# Altium footprint library Package_DFN_QFN.PcbLib: 735 footprints (part 19 of 46)
Each footprint in its own frame and in the unit in brackets; x right, y up, seen from the top. Pads: shape width x height; smd on the part's side, far side on the other; paste and mask are expansions set on the pad; w line width, h text height; cw(c..) or ccw(c..) is an arc to the next point about the centre after c.
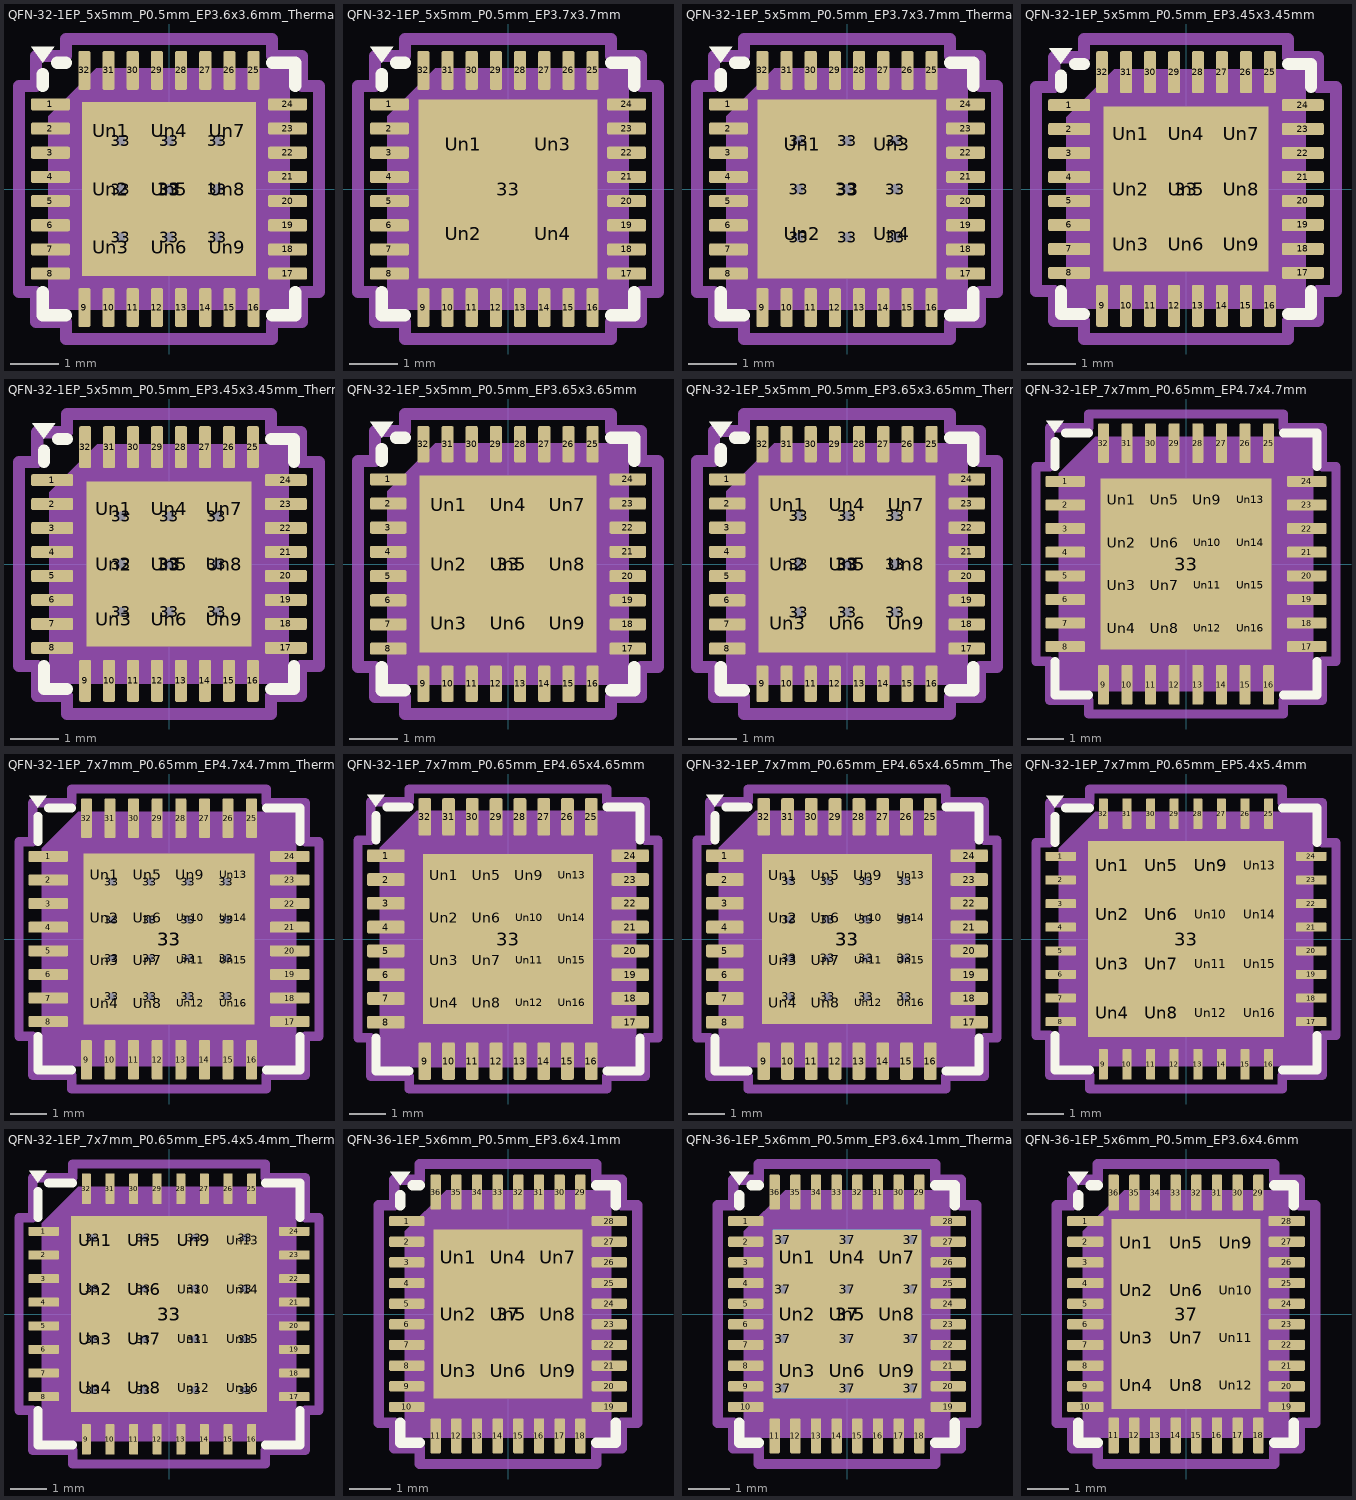
[diagram p18: the footprints below, top view; thin cyan lines are the x and y axes]

## QFN-32-1EP_5x5mm_P0.5mm_EP3.6x3.6mm_ThermalVias [mm] "QFN-32-1EP_5x5mm_P0.5mm_EP3.6x3.6mm_ThermalVias"
pads (52):
  rrect25% 0.8x0.25 smd: 1(-2.45,1.75) 2(-2.45,1.25) 3(-2.45,0.75) 4(-2.45,0.25) 5(-2.45,-0.25) 6(-2.45,-0.75) 7(-2.45,-1.25) 8(-2.45,-1.75) 17(2.45,-1.75) 18(2.45,-1.25) 19(2.45,-0.75) 20(2.45,-0.25) 21(2.45,0.25) 22(2.45,0.75) 23(2.45,1.25) 24(2.45,1.75)
  rrect25% 0.25x0.8 smd: 9(-1.75,-2.45) 10(-1.25,-2.45) 11(-0.75,-2.45) 12(-0.25,-2.45) 13(0.25,-2.45) 14(0.75,-2.45) 15(1.25,-2.45) 16(1.75,-2.45) 25(1.75,2.45) 26(1.25,2.45) 27(0.75,2.45) 28(0.25,2.45) 29(-0.25,2.45) 30(-0.75,2.45) 31(-1.25,2.45) 32(-1.75,2.45)
  round 0.5 hole 0.2: 33(-1,-1) 33(-1,0) 33(-1,1) 33(0,-1) 33(0,0) 33(0,1) 33(1,-1) 33(1,0) 33(1,1)
  rect 3.6x3.6 smd: 33(0,0)
  rect 2.5x2.5 smd far side: 33(0,0)
  rrect25% 0.97x0.97 on Top Paste: Un1(-1.2,1.2) Un2(-1.2,0) Un3(-1.2,-1.2) Un4(0,1.2) Un5(0,0) Un6(0,-1.2) Un7(1.2,1.2) Un8(1.2,0) Un9(1.2,-1.2)
F.SilkS:
  region: -2.61,2.61 -2.85,2.94 -2.37,2.94
  lines w0.254: -2.61,-2.135 -2.61,-2.61 -2.135,-2.61 ; -2.61,2.135 -2.61,2.37 ; -2.31,2.61 -2.135,2.61 ; 2.135,-2.61 2.61,-2.61 2.61,-2.135 ; 2.135,2.61 2.61,2.61 2.61,2.135
Top Component Center:
  lines w0.127: -0.127,0 0.127,0 -0.127,0 ; 0,-0.127 0,0.127 0,-0.127
Top Assembly:
  region: 2.5,-2.5 -2.5,-2.5 -2.5,1.5 -1.5,2.5 2.5,2.5
Top Courtyard:
  lines w0.254: -3.1,-2.13 -2.75,-2.13 -2.75,-2.75 -2.13,-2.75 -2.13,-3.1 2.13,-3.1 2.13,-2.75 2.75,-2.75 2.75,-2.13 3.1,-2.13 3.1,2.13 2.75,2.13 2.75,2.75 2.13,2.75 2.13,3.1 -2.13,3.1 -2.13,2.75 -2.75,2.75 -2.75,2.13 -3.1,2.13 -3.1,-2.13
Top Designator:
  text ".Designator" at -3.43,-0.344 h1.52
3D body "QFN-32-1EP_5x5mm_P0.5mm_EP3.7x3.7mm.step": height 0.85, standoff 0, extent -2.5,-2.5 2.5,2.5

## QFN-32-1EP_5x5mm_P0.5mm_EP3.7x3.7mm [mm] "QFN-32-1EP_5x5mm_P0.5mm_EP3.7x3.7mm"
pads (37):
  rrect25% 0.8x0.25 smd: 1(-2.45,1.75) 2(-2.45,1.25) 3(-2.45,0.75) 4(-2.45,0.25) 5(-2.45,-0.25) 6(-2.45,-0.75) 7(-2.45,-1.25) 8(-2.45,-1.75) 17(2.45,-1.75) 18(2.45,-1.25) 19(2.45,-0.75) 20(2.45,-0.25) 21(2.45,0.25) 22(2.45,0.75) 23(2.45,1.25) 24(2.45,1.75)
  rrect25% 0.25x0.8 smd: 9(-1.75,-2.45) 10(-1.25,-2.45) 11(-0.75,-2.45) 12(-0.25,-2.45) 13(0.25,-2.45) 14(0.75,-2.45) 15(1.25,-2.45) 16(1.75,-2.45) 25(1.75,2.45) 26(1.25,2.45) 27(0.75,2.45) 28(0.25,2.45) 29(-0.25,2.45) 30(-0.75,2.45) 31(-1.25,2.45) 32(-1.75,2.45)
  rect 3.7x3.7 smd: 33(0,0)
  rrect17% 1.49x1.49 on Top Paste: Un1(-0.925,0.925) Un2(-0.925,-0.925) Un3(0.925,0.925) Un4(0.925,-0.925)
F.SilkS:
  region: -2.61,2.61 -2.85,2.94 -2.37,2.94
  lines w0.254: -2.61,-2.135 -2.61,-2.61 -2.135,-2.61 ; -2.61,2.135 -2.61,2.37 ; -2.31,2.61 -2.135,2.61 ; 2.135,-2.61 2.61,-2.61 2.61,-2.135 ; 2.135,2.61 2.61,2.61 2.61,2.135
Top Component Center:
  lines w0.127: -0.127,0 0.127,0 -0.127,0 ; 0,-0.127 0,0.127 0,-0.127
Top Assembly:
  region: 2.5,-2.5 -2.5,-2.5 -2.5,1.5 -1.5,2.5 2.5,2.5
Top Courtyard:
  lines w0.254: -3.1,-2.13 -2.75,-2.13 -2.75,-2.75 -2.13,-2.75 -2.13,-3.1 2.13,-3.1 2.13,-2.75 2.75,-2.75 2.75,-2.13 3.1,-2.13 3.1,2.13 2.75,2.13 2.75,2.75 2.13,2.75 2.13,3.1 -2.13,3.1 -2.13,2.75 -2.75,2.75 -2.75,2.13 -3.1,2.13 -3.1,-2.13
Top Designator:
  text ".Designator" at -3.43,-0.344 h1.52
3D body "QFN-32-1EP_5x5mm_P0.5mm_EP3.7x3.7mm.step": height 0.85, standoff 0, extent -2.5,-2.5 2.5,2.5

## QFN-32-1EP_5x5mm_P0.5mm_EP3.7x3.7mm_ThermalVias [mm] "QFN-32-1EP_5x5mm_P0.5mm_EP3.7x3.7mm_ThermalVias"
pads (47):
  rrect25% 0.8x0.25 smd: 1(-2.45,1.75) 2(-2.45,1.25) 3(-2.45,0.75) 4(-2.45,0.25) 5(-2.45,-0.25) 6(-2.45,-0.75) 7(-2.45,-1.25) 8(-2.45,-1.75) 17(2.45,-1.75) 18(2.45,-1.25) 19(2.45,-0.75) 20(2.45,-0.25) 21(2.45,0.25) 22(2.45,0.75) 23(2.45,1.25) 24(2.45,1.75)
  rrect25% 0.25x0.8 smd: 9(-1.75,-2.45) 10(-1.25,-2.45) 11(-0.75,-2.45) 12(-0.25,-2.45) 13(0.25,-2.45) 14(0.75,-2.45) 15(1.25,-2.45) 16(1.75,-2.45) 25(1.75,2.45) 26(1.25,2.45) 27(0.75,2.45) 28(0.25,2.45) 29(-0.25,2.45) 30(-0.75,2.45) 31(-1.25,2.45) 32(-1.75,2.45)
  round 0.5 hole 0.2: 33(-1,-1) 33(-1,0) 33(-1,1) 33(0,-1) 33(0,0) 33(0,1) 33(1,-1) 33(1,0) 33(1,1)
  rect 3.7x3.7 smd: 33(0,0)
  rect 2.5x2.5 smd far side: 33(0,0)
  rrect17% 1.49x1.49 on Top Paste: Un1(-0.925,0.925) Un2(-0.925,-0.925) Un3(0.925,0.925) Un4(0.925,-0.925)
F.SilkS:
  region: -2.61,2.61 -2.85,2.94 -2.37,2.94
  lines w0.254: -2.61,-2.135 -2.61,-2.61 -2.135,-2.61 ; -2.61,2.135 -2.61,2.37 ; -2.31,2.61 -2.135,2.61 ; 2.135,-2.61 2.61,-2.61 2.61,-2.135 ; 2.135,2.61 2.61,2.61 2.61,2.135
Top Component Center:
  lines w0.127: -0.127,0 0.127,0 -0.127,0 ; 0,-0.127 0,0.127 0,-0.127
Top Assembly:
  region: 2.5,-2.5 -2.5,-2.5 -2.5,1.5 -1.5,2.5 2.5,2.5
Top Courtyard:
  lines w0.254: -3.1,-2.13 -3.1,2.13 -2.75,2.13 -2.75,2.75 -2.13,2.75 -2.13,3.1 2.13,3.1 2.13,2.75 2.75,2.75 2.75,2.13 3.1,2.13 3.1,-2.13 2.75,-2.13 2.75,-2.75 2.13,-2.75 2.13,-3.1 -2.13,-3.1 -2.13,-2.75 -2.75,-2.75 -2.75,-2.13 -3.1,-2.13
Top Designator:
  text ".Designator" at -3.43,-0.344 h1.52
3D body "QFN-32-1EP_5x5mm_P0.5mm_EP3.7x3.7mm.step": height 0.85, standoff 0, extent -2.5,-2.5 2.5,2.5

## QFN-32-1EP_5x5mm_P0.5mm_EP3.45x3.45mm [mm] "QFN-32-1EP_5x5mm_P0.5mm_EP3.45x3.45mm"
pads (42):
  rrect25% 0.875x0.25 smd: 1(-2.438,1.75) 2(-2.438,1.25) 3(-2.438,0.75) 4(-2.438,0.25) 5(-2.438,-0.25) 6(-2.438,-0.75) 7(-2.438,-1.25) 8(-2.438,-1.75) 17(2.438,-1.75) 18(2.438,-1.25) 19(2.438,-0.75) 20(2.438,-0.25) 21(2.438,0.25) 22(2.438,0.75) 23(2.438,1.25) 24(2.438,1.75)
  rrect25% 0.25x0.875 smd: 9(-1.75,-2.438) 10(-1.25,-2.438) 11(-0.75,-2.438) 12(-0.25,-2.438) 13(0.25,-2.438) 14(0.75,-2.438) 15(1.25,-2.438) 16(1.75,-2.438) 25(1.75,2.438) 26(1.25,2.438) 27(0.75,2.438) 28(0.25,2.438) 29(-0.25,2.438) 30(-0.75,2.438) 31(-1.25,2.438) 32(-1.75,2.438)
  rect 3.45x3.45 smd: 33(0,0)
  rrect25% 0.93x0.93 on Top Paste: Un1(-1.15,1.15) Un2(-1.15,0) Un3(-1.15,-1.15) Un4(0,1.15) Un5(0,0) Un6(0,-1.15) Un7(1.15,1.15) Un8(1.15,0) Un9(1.15,-1.15)
F.SilkS:
  region: -2.61,2.61 -2.85,2.94 -2.37,2.94
  lines w0.254: -2.61,-2.135 -2.61,-2.61 -2.135,-2.61 ; -2.61,2.135 -2.61,2.37 ; -2.31,2.61 -2.135,2.61 ; 2.135,-2.61 2.61,-2.61 2.61,-2.135 ; 2.135,2.61 2.61,2.61 2.61,2.135
Top Component Center:
  lines w0.127: -0.127,0 0.127,0 -0.127,0 ; 0,-0.127 0,0.127 0,-0.127
Top Assembly:
  region: 2.5,-2.5 -2.5,-2.5 -2.5,1.5 -1.5,2.5 2.5,2.5
Top Courtyard:
  lines w0.254: -3.13,-2.13 -3.13,2.13 -2.75,2.13 -2.75,2.75 -2.13,2.75 -2.13,3.13 2.13,3.13 2.13,2.75 2.75,2.75 2.75,2.13 3.13,2.13 3.13,-2.13 2.75,-2.13 2.75,-2.75 2.13,-2.75 2.13,-3.13 -2.13,-3.13 -2.13,-2.75 -2.75,-2.75 -2.75,-2.13 -3.13,-2.13
Top Designator:
  text ".Designator" at -3.43,-0.344 h1.52
3D body "QFN-32-1EP_5x5mm_P0.5mm_EP3.45x3.45mm.step": height 0.77, standoff 0, extent -2.5,-2.5 2.5,2.5

## QFN-32-1EP_5x5mm_P0.5mm_EP3.45x3.45mm_ThermalVias [mm] "QFN-32-1EP_5x5mm_P0.5mm_EP3.45x3.45mm_ThermalVias"
pads (52):
  rrect25% 0.875x0.25 smd: 1(-2.438,1.75) 2(-2.438,1.25) 3(-2.438,0.75) 4(-2.438,0.25) 5(-2.438,-0.25) 6(-2.438,-0.75) 7(-2.438,-1.25) 8(-2.438,-1.75) 17(2.438,-1.75) 18(2.438,-1.25) 19(2.438,-0.75) 20(2.438,-0.25) 21(2.438,0.25) 22(2.438,0.75) 23(2.438,1.25) 24(2.438,1.75)
  rrect25% 0.25x0.875 smd: 9(-1.75,-2.438) 10(-1.25,-2.438) 11(-0.75,-2.438) 12(-0.25,-2.438) 13(0.25,-2.438) 14(0.75,-2.438) 15(1.25,-2.438) 16(1.75,-2.438) 25(1.75,2.438) 26(1.25,2.438) 27(0.75,2.438) 28(0.25,2.438) 29(-0.25,2.438) 30(-0.75,2.438) 31(-1.25,2.438) 32(-1.75,2.438)
  round 0.5 hole 0.2: 33(-1,-1) 33(-1,0) 33(-1,1) 33(0,-1) 33(0,0) 33(0,1) 33(1,-1) 33(1,0) 33(1,1)
  rect 3.45x3.45 smd: 33(0,0)
  rect 2.5x2.5 smd far side: 33(0,0)
  rrect25% 0.93x0.93 on Top Paste: Un1(-1.15,1.15) Un2(-1.15,0) Un3(-1.15,-1.15) Un4(0,1.15) Un5(0,0) Un6(0,-1.15) Un7(1.15,1.15) Un8(1.15,0) Un9(1.15,-1.15)
F.SilkS:
  region: -2.61,2.61 -2.85,2.94 -2.37,2.94
  lines w0.254: -2.61,-2.135 -2.61,-2.61 -2.135,-2.61 ; -2.61,2.135 -2.61,2.37 ; -2.31,2.61 -2.135,2.61 ; 2.135,-2.61 2.61,-2.61 2.61,-2.135 ; 2.135,2.61 2.61,2.61 2.61,2.135
Top Component Center:
  lines w0.127: -0.127,0 0.127,0 -0.127,0 ; 0,-0.127 0,0.127 0,-0.127
Top Assembly:
  region: 2.5,-2.5 -2.5,-2.5 -2.5,1.5 -1.5,2.5 2.5,2.5
Top Courtyard:
  lines w0.254: -3.13,-2.13 -2.75,-2.13 -2.75,-2.75 -2.13,-2.75 -2.13,-3.13 2.13,-3.13 2.13,-2.75 2.75,-2.75 2.75,-2.13 3.13,-2.13 3.13,2.13 2.75,2.13 2.75,2.75 2.13,2.75 2.13,3.13 -2.13,3.13 -2.13,2.75 -2.75,2.75 -2.75,2.13 -3.13,2.13 -3.13,-2.13
Top Designator:
  text ".Designator" at -3.43,-0.344 h1.52
3D body "QFN-32-1EP_5x5mm_P0.5mm_EP3.45x3.45mm.step": height 0.77, standoff 0, extent -2.5,-2.5 2.5,2.5

## QFN-32-1EP_5x5mm_P0.5mm_EP3.65x3.65mm [mm] "QFN-32-1EP_5x5mm_P0.5mm_EP3.65x3.65mm"
pads (42):
  rrect25% 0.75x0.25 smd: 1(-2.475,1.75) 2(-2.475,1.25) 3(-2.475,0.75) 4(-2.475,0.25) 5(-2.475,-0.25) 6(-2.475,-0.75) 7(-2.475,-1.25) 8(-2.475,-1.75) 17(2.475,-1.75) 18(2.475,-1.25) 19(2.475,-0.75) 20(2.475,-0.25) 21(2.475,0.25) 22(2.475,0.75) 23(2.475,1.25) 24(2.475,1.75)
  rrect25% 0.25x0.75 smd: 9(-1.75,-2.475) 10(-1.25,-2.475) 11(-0.75,-2.475) 12(-0.25,-2.475) 13(0.25,-2.475) 14(0.75,-2.475) 15(1.25,-2.475) 16(1.75,-2.475) 25(1.75,2.475) 26(1.25,2.475) 27(0.75,2.475) 28(0.25,2.475) 29(-0.25,2.475) 30(-0.75,2.475) 31(-1.25,2.475) 32(-1.75,2.475)
  rect 3.65x3.65 smd: 33(0,0)
  rrect25% 0.98x0.98 on Top Paste: Un1(-1.22,1.22) Un2(-1.22,0) Un3(-1.22,-1.22) Un4(0,1.22) Un5(0,0) Un6(0,-1.22) Un7(1.22,1.22) Un8(1.22,0) Un9(1.22,-1.22)
F.SilkS:
  region: -2.61,2.61 -2.85,2.94 -2.37,2.94
  lines w0.254: -2.61,-2.135 -2.61,-2.61 -2.135,-2.61 ; -2.61,2.135 -2.61,2.37 ; -2.31,2.61 -2.135,2.61 ; 2.135,-2.61 2.61,-2.61 2.61,-2.135 ; 2.135,2.61 2.61,2.61 2.61,2.135
Top Component Center:
  lines w0.127: -0.127,0 0.127,0 -0.127,0 ; 0,-0.127 0,0.127 0,-0.127
Top Assembly:
  region: 2.5,-2.5 -2.5,-2.5 -2.5,1.5 -1.5,2.5 2.5,2.5
Top Courtyard:
  lines w0.254: -3.1,-2.13 -2.75,-2.13 -2.75,-2.75 -2.13,-2.75 -2.13,-3.1 2.13,-3.1 2.13,-2.75 2.75,-2.75 2.75,-2.13 3.1,-2.13 3.1,2.13 2.75,2.13 2.75,2.75 2.13,2.75 2.13,3.1 -2.13,3.1 -2.13,2.75 -2.75,2.75 -2.75,2.13 -3.1,2.13 -3.1,-2.13
Top Designator:
  text ".Designator" at -3.43,-0.344 h1.52
3D body "QFN-32-1EP_5x5mm_P0.5mm_EP3.7x3.7mm.step": height 0.85, standoff 0, extent -2.5,-2.5 2.5,2.5

## QFN-32-1EP_5x5mm_P0.5mm_EP3.65x3.65mm_ThermalVias [mm] "QFN-32-1EP_5x5mm_P0.5mm_EP3.65x3.65mm_ThermalVias"
pads (52):
  rrect25% 0.75x0.25 smd: 1(-2.475,1.75) 2(-2.475,1.25) 3(-2.475,0.75) 4(-2.475,0.25) 5(-2.475,-0.25) 6(-2.475,-0.75) 7(-2.475,-1.25) 8(-2.475,-1.75) 17(2.475,-1.75) 18(2.475,-1.25) 19(2.475,-0.75) 20(2.475,-0.25) 21(2.475,0.25) 22(2.475,0.75) 23(2.475,1.25) 24(2.475,1.75)
  rrect25% 0.25x0.75 smd: 9(-1.75,-2.475) 10(-1.25,-2.475) 11(-0.75,-2.475) 12(-0.25,-2.475) 13(0.25,-2.475) 14(0.75,-2.475) 15(1.25,-2.475) 16(1.75,-2.475) 25(1.75,2.475) 26(1.25,2.475) 27(0.75,2.475) 28(0.25,2.475) 29(-0.25,2.475) 30(-0.75,2.475) 31(-1.25,2.475) 32(-1.75,2.475)
  round 0.5 hole 0.2: 33(-1,-1) 33(-1,0) 33(-1,1) 33(0,-1) 33(0,0) 33(0,1) 33(1,-1) 33(1,0) 33(1,1)
  rect 3.65x3.65 smd: 33(0,0)
  rect 2.5x2.5 smd far side: 33(0,0)
  rrect25% 0.98x0.98 on Top Paste: Un1(-1.22,1.22) Un2(-1.22,0) Un3(-1.22,-1.22) Un4(0,1.22) Un5(0,0) Un6(0,-1.22) Un7(1.22,1.22) Un8(1.22,0) Un9(1.22,-1.22)
F.SilkS:
  region: -2.61,2.61 -2.85,2.94 -2.37,2.94
  lines w0.254: -2.61,-2.135 -2.61,-2.61 -2.135,-2.61 ; -2.61,2.135 -2.61,2.37 ; -2.31,2.61 -2.135,2.61 ; 2.135,-2.61 2.61,-2.61 2.61,-2.135 ; 2.135,2.61 2.61,2.61 2.61,2.135
Top Component Center:
  lines w0.127: -0.127,0 0.127,0 -0.127,0 ; 0,-0.127 0,0.127 0,-0.127
Top Assembly:
  region: 2.5,-2.5 -2.5,-2.5 -2.5,1.5 -1.5,2.5 2.5,2.5
Top Courtyard:
  lines w0.254: -3.1,-2.13 -3.1,2.13 -2.75,2.13 -2.75,2.75 -2.13,2.75 -2.13,3.1 2.13,3.1 2.13,2.75 2.75,2.75 2.75,2.13 3.1,2.13 3.1,-2.13 2.75,-2.13 2.75,-2.75 2.13,-2.75 2.13,-3.1 -2.13,-3.1 -2.13,-2.75 -2.75,-2.75 -2.75,-2.13 -3.1,-2.13
Top Designator:
  text ".Designator" at -3.43,-0.344 h1.52
3D body "QFN-32-1EP_5x5mm_P0.5mm_EP3.7x3.7mm.step": height 0.85, standoff 0, extent -2.5,-2.5 2.5,2.5

## QFN-32-1EP_7x7mm_P0.65mm_EP4.7x4.7mm [mm] "QFN-32-1EP_7x7mm_P0.65mm_EP4.7x4.7mm"
pads (49):
  rrect25% 1.1x0.3 smd: 1(-3.325,2.275) 2(-3.325,1.625) 3(-3.325,0.975) 4(-3.325,0.325) 5(-3.325,-0.325) 6(-3.325,-0.975) 7(-3.325,-1.625) 8(-3.325,-2.275) 17(3.325,-2.275) 18(3.325,-1.625) 19(3.325,-0.975) 20(3.325,-0.325) 21(3.325,0.325) 22(3.325,0.975) 23(3.325,1.625) 24(3.325,2.275)
  rrect25% 0.3x1.1 smd: 9(-2.275,-3.325) 10(-1.625,-3.325) 11(-0.975,-3.325) 12(-0.325,-3.325) 13(0.325,-3.325) 14(0.975,-3.325) 15(1.625,-3.325) 16(2.275,-3.325) 25(2.275,3.325) 26(1.625,3.325) 27(0.975,3.325) 28(0.325,3.325) 29(-0.325,3.325) 30(-0.975,3.325) 31(-1.625,3.325) 32(-2.275,3.325)
  rect 4.7x4.7 smd: 33(0,0)
  rrect25% 0.95x0.95 on Top Paste: Un1(-1.77,1.77) Un2(-1.77,0.59) Un3(-1.77,-0.59) Un4(-1.77,-1.77) Un5(-0.59,1.77) Un6(-0.59,0.59) Un7(-0.59,-0.59) Un8(-0.59,-1.77) Un9(0.59,1.77) Un10(0.59,0.59) Un11(0.59,-0.59) Un12(0.59,-1.77) Un13(1.77,1.77) Un14(1.77,0.59) Un15(1.77,-0.59) Un16(1.77,-1.77)
F.SilkS:
  region: -3.61,3.61 -3.85,3.94 -3.37,3.94
  lines w0.254: -3.61,-2.685 -3.61,-3.61 -2.685,-3.61 ; -3.61,2.685 -3.61,3.37 ; -3.31,3.61 -2.685,3.61 ; 2.685,-3.61 3.61,-3.61 3.61,-2.685 ; 2.685,3.61 3.61,3.61 3.61,2.685
Top Component Center:
  lines w0.127: -0.127,0 0.127,0 -0.127,0 ; 0,-0.127 0,0.127 0,-0.127
Top Assembly:
  region: 3.5,-3.5 -3.5,-3.5 -3.5,2.5 -2.5,3.5 3.5,3.5
Top Courtyard:
  lines w0.254: -4.13,-2.68 -4.13,2.68 -3.75,2.68 -3.75,3.75 -2.68,3.75 -2.68,4.13 2.68,4.13 2.68,3.75 3.75,3.75 3.75,2.68 4.13,2.68 4.13,-2.68 3.75,-2.68 3.75,-3.75 2.68,-3.75 2.68,-4.13 -2.68,-4.13 -2.68,-3.75 -3.75,-3.75 -3.75,-2.68 -4.13,-2.68
Top Designator:
  text ".Designator" at -3.43,-0.344 h1.52
3D body "QFN-32-1EP_7x7mm_P0.65mm_EP5.46x5.46mm.step": height 0.87, standoff 0, extent -3.5,-3.5 3.5,3.5

## QFN-32-1EP_7x7mm_P0.65mm_EP4.7x4.7mm_ThermalVias [mm] "QFN-32-1EP_7x7mm_P0.65mm_EP4.7x4.7mm_ThermalVias"
pads (66):
  rrect25% 1.1x0.3 smd: 1(-3.325,2.275) 2(-3.325,1.625) 3(-3.325,0.975) 4(-3.325,0.325) 5(-3.325,-0.325) 6(-3.325,-0.975) 7(-3.325,-1.625) 8(-3.325,-2.275) 17(3.325,-2.275) 18(3.325,-1.625) 19(3.325,-0.975) 20(3.325,-0.325) 21(3.325,0.325) 22(3.325,0.975) 23(3.325,1.625) 24(3.325,2.275)
  rrect25% 0.3x1.1 smd: 9(-2.275,-3.325) 10(-1.625,-3.325) 11(-0.975,-3.325) 12(-0.325,-3.325) 13(0.325,-3.325) 14(0.975,-3.325) 15(1.625,-3.325) 16(2.275,-3.325) 25(2.275,3.325) 26(1.625,3.325) 27(0.975,3.325) 28(0.325,3.325) 29(-0.325,3.325) 30(-0.975,3.325) 31(-1.625,3.325) 32(-2.275,3.325)
  round 0.5 hole 0.2: 33(-1.575,-1.575) 33(-1.575,-0.525) 33(-1.575,0.525) 33(-1.575,1.575) 33(-0.525,-1.575) 33(-0.525,-0.525) 33(-0.525,0.525) 33(-0.525,1.575) 33(0.525,-1.575) 33(0.525,-0.525) 33(0.525,0.525) 33(0.525,1.575) 33(1.575,-1.575) 33(1.575,-0.525) 33(1.575,0.525) 33(1.575,1.575)
  rect 4.7x4.7 smd: 33(0,0)
  rect 3.65x3.65 smd far side: 33(0,0)
  rrect25% 0.95x0.95 on Top Paste: Un1(-1.77,1.77) Un2(-1.77,0.59) Un3(-1.77,-0.59) Un4(-1.77,-1.77) Un5(-0.59,1.77) Un6(-0.59,0.59) Un7(-0.59,-0.59) Un8(-0.59,-1.77) Un9(0.59,1.77) Un10(0.59,0.59) Un11(0.59,-0.59) Un12(0.59,-1.77) Un13(1.77,1.77) Un14(1.77,0.59) Un15(1.77,-0.59) Un16(1.77,-1.77)
F.SilkS:
  region: -3.61,3.61 -3.85,3.94 -3.37,3.94
  lines w0.254: -3.61,-2.685 -3.61,-3.61 -2.685,-3.61 ; -3.61,2.685 -3.61,3.37 ; -3.31,3.61 -2.685,3.61 ; 2.685,-3.61 3.61,-3.61 3.61,-2.685 ; 2.685,3.61 3.61,3.61 3.61,2.685
Top Component Center:
  lines w0.127: -0.127,0 0.127,0 -0.127,0 ; 0,-0.127 0,0.127 0,-0.127
Top Assembly:
  region: 3.5,-3.5 -3.5,-3.5 -3.5,2.5 -2.5,3.5 3.5,3.5
Top Courtyard:
  lines w0.254: -4.13,-2.68 -4.13,2.68 -3.75,2.68 -3.75,3.75 -2.68,3.75 -2.68,4.13 2.68,4.13 2.68,3.75 3.75,3.75 3.75,2.68 4.13,2.68 4.13,-2.68 3.75,-2.68 3.75,-3.75 2.68,-3.75 2.68,-4.13 -2.68,-4.13 -2.68,-3.75 -3.75,-3.75 -3.75,-2.68 -4.13,-2.68
Top Designator:
  text ".Designator" at -3.43,-0.344 h1.52
3D body "QFN-32-1EP_7x7mm_P0.65mm_EP5.46x5.46mm.step": height 0.87, standoff 0, extent -3.5,-3.5 3.5,3.5

## QFN-32-1EP_7x7mm_P0.65mm_EP4.65x4.65mm [mm] "QFN-32-1EP_7x7mm_P0.65mm_EP4.65x4.65mm"
pads (49):
  rrect25% 1.025x0.35 smd: 1(-3.337,2.275) 2(-3.337,1.625) 3(-3.337,0.975) 4(-3.337,0.325) 5(-3.337,-0.325) 6(-3.337,-0.975) 7(-3.337,-1.625) 8(-3.337,-2.275) 17(3.337,-2.275) 18(3.337,-1.625) 19(3.337,-0.975) 20(3.337,-0.325) 21(3.337,0.325) 22(3.337,0.975) 23(3.337,1.625) 24(3.337,2.275)
  rrect25% 0.35x1.025 smd: 9(-2.275,-3.337) 10(-1.625,-3.337) 11(-0.975,-3.337) 12(-0.325,-3.337) 13(0.325,-3.337) 14(0.975,-3.337) 15(1.625,-3.337) 16(2.275,-3.337) 25(2.275,3.337) 26(1.625,3.337) 27(0.975,3.337) 28(0.325,3.337) 29(-0.325,3.337) 30(-0.975,3.337) 31(-1.625,3.337) 32(-2.275,3.337)
  rect 4.65x4.65 smd: 33(0,0)
  rrect25% 0.94x0.94 on Top Paste: Un1(-1.74,1.74) Un2(-1.74,0.58) Un3(-1.74,-0.58) Un4(-1.74,-1.74) Un5(-0.58,1.74) Un6(-0.58,0.58) Un7(-0.58,-0.58) Un8(-0.58,-1.74) Un9(0.58,1.74) Un10(0.58,0.58) Un11(0.58,-0.58) Un12(0.58,-1.74) Un13(1.74,1.74) Un14(1.74,0.58) Un15(1.74,-0.58) Un16(1.74,-1.74)
F.SilkS:
  region: -3.61,3.61 -3.85,3.94 -3.37,3.94
  lines w0.254: -3.61,-2.71 -3.61,-3.61 -2.71,-3.61 ; -3.61,2.71 -3.61,3.37 ; -3.31,3.61 -2.71,3.61 ; 2.71,-3.61 3.61,-3.61 3.61,-2.71 ; 2.71,3.61 3.61,3.61 3.61,2.71
Top Component Center:
  lines w0.127: -0.127,0 0.127,0 -0.127,0 ; 0,-0.127 0,0.127 0,-0.127
Top Assembly:
  region: 3.5,-3.5 -3.5,-3.5 -3.5,2.5 -2.5,3.5 3.5,3.5
Top Courtyard:
  lines w0.254: -4.1,-2.7 -4.1,2.7 -3.75,2.7 -3.75,3.75 -2.7,3.75 -2.7,4.1 2.7,4.1 2.7,3.75 3.75,3.75 3.75,2.7 4.1,2.7 4.1,-2.7 3.75,-2.7 3.75,-3.75 2.7,-3.75 2.7,-4.1 -2.7,-4.1 -2.7,-3.75 -3.75,-3.75 -3.75,-2.7 -4.1,-2.7
Top Designator:
  text ".Designator" at -3.43,-0.344 h1.52
3D body "QFN-32-1EP_7x7mm_P0.65mm_EP5.46x5.46mm.step": height 0.87, standoff 0, extent -3.5,-3.5 3.5,3.5

## QFN-32-1EP_7x7mm_P0.65mm_EP4.65x4.65mm_ThermalVias [mm] "QFN-32-1EP_7x7mm_P0.65mm_EP4.65x4.65mm_ThermalVias"
pads (66):
  rrect25% 1.025x0.35 smd: 1(-3.337,2.275) 2(-3.337,1.625) 3(-3.337,0.975) 4(-3.337,0.325) 5(-3.337,-0.325) 6(-3.337,-0.975) 7(-3.337,-1.625) 8(-3.337,-2.275) 17(3.337,-2.275) 18(3.337,-1.625) 19(3.337,-0.975) 20(3.337,-0.325) 21(3.337,0.325) 22(3.337,0.975) 23(3.337,1.625) 24(3.337,2.275)
  rrect25% 0.35x1.025 smd: 9(-2.275,-3.337) 10(-1.625,-3.337) 11(-0.975,-3.337) 12(-0.325,-3.337) 13(0.325,-3.337) 14(0.975,-3.337) 15(1.625,-3.337) 16(2.275,-3.337) 25(2.275,3.337) 26(1.625,3.337) 27(0.975,3.337) 28(0.325,3.337) 29(-0.325,3.337) 30(-0.975,3.337) 31(-1.625,3.337) 32(-2.275,3.337)
  round 0.5 hole 0.2: 33(-1.575,-1.575) 33(-1.575,-0.525) 33(-1.575,0.525) 33(-1.575,1.575) 33(-0.525,-1.575) 33(-0.525,-0.525) 33(-0.525,0.525) 33(-0.525,1.575) 33(0.525,-1.575) 33(0.525,-0.525) 33(0.525,0.525) 33(0.525,1.575) 33(1.575,-1.575) 33(1.575,-0.525) 33(1.575,0.525) 33(1.575,1.575)
  rect 4.65x4.65 smd: 33(0,0)
  rect 3.65x3.65 smd far side: 33(0,0)
  rrect25% 0.94x0.94 on Top Paste: Un1(-1.74,1.74) Un2(-1.74,0.58) Un3(-1.74,-0.58) Un4(-1.74,-1.74) Un5(-0.58,1.74) Un6(-0.58,0.58) Un7(-0.58,-0.58) Un8(-0.58,-1.74) Un9(0.58,1.74) Un10(0.58,0.58) Un11(0.58,-0.58) Un12(0.58,-1.74) Un13(1.74,1.74) Un14(1.74,0.58) Un15(1.74,-0.58) Un16(1.74,-1.74)
F.SilkS:
  region: -3.61,3.61 -3.85,3.94 -3.37,3.94
  lines w0.254: -3.61,-2.71 -3.61,-3.61 -2.71,-3.61 ; -3.61,2.71 -3.61,3.37 ; -3.31,3.61 -2.71,3.61 ; 2.71,-3.61 3.61,-3.61 3.61,-2.71 ; 2.71,3.61 3.61,3.61 3.61,2.71
Top Component Center:
  lines w0.127: -0.127,0 0.127,0 -0.127,0 ; 0,-0.127 0,0.127 0,-0.127
Top Assembly:
  region: 3.5,-3.5 -3.5,-3.5 -3.5,2.5 -2.5,3.5 3.5,3.5
Top Courtyard:
  lines w0.254: -4.1,-2.7 -4.1,2.7 -3.75,2.7 -3.75,3.75 -2.7,3.75 -2.7,4.1 2.7,4.1 2.7,3.75 3.75,3.75 3.75,2.7 4.1,2.7 4.1,-2.7 3.75,-2.7 3.75,-3.75 2.7,-3.75 2.7,-4.1 -2.7,-4.1 -2.7,-3.75 -3.75,-3.75 -3.75,-2.7 -4.1,-2.7
Top Designator:
  text ".Designator" at -3.43,-0.344 h1.52
3D body "QFN-32-1EP_7x7mm_P0.65mm_EP5.46x5.46mm.step": height 0.87, standoff 0, extent -3.5,-3.5 3.5,3.5

## QFN-32-1EP_7x7mm_P0.65mm_EP5.4x5.4mm [mm] "QFN-32-1EP_7x7mm_P0.65mm_EP5.4x5.4mm"
pads (49):
  rrect25% 0.85x0.25 smd: 1(-3.45,2.275) 2(-3.45,1.625) 3(-3.45,0.975) 4(-3.45,0.325) 5(-3.45,-0.325) 6(-3.45,-0.975) 7(-3.45,-1.625) 8(-3.45,-2.275) 17(3.45,-2.275) 18(3.45,-1.625) 19(3.45,-0.975) 20(3.45,-0.325) 21(3.45,0.325) 22(3.45,0.975) 23(3.45,1.625) 24(3.45,2.275)
  rrect25% 0.25x0.85 smd: 9(-2.275,-3.45) 10(-1.625,-3.45) 11(-0.975,-3.45) 12(-0.325,-3.45) 13(0.325,-3.45) 14(0.975,-3.45) 15(1.625,-3.45) 16(2.275,-3.45) 25(2.275,3.45) 26(1.625,3.45) 27(0.975,3.45) 28(0.325,3.45) 29(-0.325,3.45) 30(-0.975,3.45) 31(-1.625,3.45) 32(-2.275,3.45)
  rect 5.4x5.4 smd: 33(0,0)
  rrect23% 1.09x1.09 on Top Paste: Un1(-2.025,2.025) Un2(-2.025,0.675) Un3(-2.025,-0.675) Un4(-2.025,-2.025) Un5(-0.675,2.025) Un6(-0.675,0.675) Un7(-0.675,-0.675) Un8(-0.675,-2.025) Un9(0.675,2.025) Un10(0.675,0.675) Un11(0.675,-0.675) Un12(0.675,-2.025) Un13(2.025,2.025) Un14(2.025,0.675) Un15(2.025,-0.675) Un16(2.025,-2.025)
F.SilkS:
  region: -3.61,3.61 -3.85,3.94 -3.37,3.94
  lines w0.254: -3.61,-2.66 -3.61,-3.61 -2.66,-3.61 ; -3.61,2.66 -3.61,3.37 ; -3.31,3.61 -2.66,3.61 ; 2.66,-3.61 3.61,-3.61 3.61,-2.66 ; 2.66,3.61 3.61,3.61 3.61,2.66
Top Component Center:
  lines w0.127: -0.127,0 0.127,0 -0.127,0 ; 0,-0.127 0,0.127 0,-0.127
Top Assembly:
  region: 3.5,-3.5 -3.5,-3.5 -3.5,2.5 -2.5,3.5 3.5,3.5
Top Courtyard:
  lines w0.254: -4.13,-2.65 -3.75,-2.65 -3.75,-3.75 -2.65,-3.75 -2.65,-4.13 2.65,-4.13 2.65,-3.75 3.75,-3.75 3.75,-2.65 4.13,-2.65 4.13,2.65 3.75,2.65 3.75,3.75 2.65,3.75 2.65,4.13 -2.65,4.13 -2.65,3.75 -3.75,3.75 -3.75,2.65 -4.13,2.65 -4.13,-2.65
Top Designator:
  text ".Designator" at -3.43,-0.344 h1.52
3D body "QFN-32-1EP_7x7mm_P0.65mm_EP5.46x5.46mm.step": height 0.87, standoff 0, extent -3.5,-3.5 3.5,3.5

## QFN-32-1EP_7x7mm_P0.65mm_EP5.4x5.4mm_ThermalVias [mm] "QFN-32-1EP_7x7mm_P0.65mm_EP5.4x5.4mm_ThermalVias"
pads (66):
  rrect25% 0.85x0.25 smd: 1(-3.45,2.275) 2(-3.45,1.625) 3(-3.45,0.975) 4(-3.45,0.325) 5(-3.45,-0.325) 6(-3.45,-0.975) 7(-3.45,-1.625) 8(-3.45,-2.275) 17(3.45,-2.275) 18(3.45,-1.625) 19(3.45,-0.975) 20(3.45,-0.325) 21(3.45,0.325) 22(3.45,0.975) 23(3.45,1.625) 24(3.45,2.275)
  rrect25% 0.25x0.85 smd: 9(-2.275,-3.45) 10(-1.625,-3.45) 11(-0.975,-3.45) 12(-0.325,-3.45) 13(0.325,-3.45) 14(0.975,-3.45) 15(1.625,-3.45) 16(2.275,-3.45) 25(2.275,3.45) 26(1.625,3.45) 27(0.975,3.45) 28(0.325,3.45) 29(-0.325,3.45) 30(-0.975,3.45) 31(-1.625,3.45) 32(-2.275,3.45)
  round 0.5 hole 0.2: 33(-2.1,-2.1) 33(-2.1,-0.7) 33(-2.1,0.7) 33(-2.1,2.1) 33(-0.7,-2.1) 33(-0.7,-0.7) 33(-0.7,0.7) 33(-0.7,2.1) 33(0.7,-2.1) 33(0.7,-0.7) 33(0.7,0.7) 33(0.7,2.1) 33(2.1,-2.1) 33(2.1,-0.7) 33(2.1,0.7) 33(2.1,2.1)
  rect 5.4x5.4 smd: 33(0,0)
  rect 4.7x4.7 smd far side: 33(0,0)
  rrect23% 1.09x1.09 on Top Paste: Un1(-2.025,2.025) Un2(-2.025,0.675) Un3(-2.025,-0.675) Un4(-2.025,-2.025) Un5(-0.675,2.025) Un6(-0.675,0.675) Un7(-0.675,-0.675) Un8(-0.675,-2.025) Un9(0.675,2.025) Un10(0.675,0.675) Un11(0.675,-0.675) Un12(0.675,-2.025) Un13(2.025,2.025) Un14(2.025,0.675) Un15(2.025,-0.675) Un16(2.025,-2.025)
F.SilkS:
  region: -3.61,3.61 -3.85,3.94 -3.37,3.94
  lines w0.254: -3.61,-2.66 -3.61,-3.61 -2.66,-3.61 ; -3.61,2.66 -3.61,3.37 ; -3.31,3.61 -2.66,3.61 ; 2.66,-3.61 3.61,-3.61 3.61,-2.66 ; 2.66,3.61 3.61,3.61 3.61,2.66
Top Component Center:
  lines w0.127: -0.127,0 0.127,0 -0.127,0 ; 0,-0.127 0,0.127 0,-0.127
Top Assembly:
  region: 3.5,-3.5 -3.5,-3.5 -3.5,2.5 -2.5,3.5 3.5,3.5
Top Courtyard:
  lines w0.254: -4.13,-2.65 -4.13,2.65 -3.75,2.65 -3.75,3.75 -2.65,3.75 -2.65,4.13 2.65,4.13 2.65,3.75 3.75,3.75 3.75,2.65 4.13,2.65 4.13,-2.65 3.75,-2.65 3.75,-3.75 2.65,-3.75 2.65,-4.13 -2.65,-4.13 -2.65,-3.75 -3.75,-3.75 -3.75,-2.65 -4.13,-2.65
Top Designator:
  text ".Designator" at -3.43,-0.344 h1.52
3D body "QFN-32-1EP_7x7mm_P0.65mm_EP5.46x5.46mm.step": height 0.87, standoff 0, extent -3.5,-3.5 3.5,3.5

## QFN-36-1EP_5x6mm_P0.5mm_EP3.6x4.1mm [mm] "QFN-36-1EP_5x6mm_P0.5mm_EP3.6x4.1mm"
pads (46):
  rrect25% 0.85x0.25 smd: 1(-2.45,2.25) 2(-2.45,1.75) 3(-2.45,1.25) 4(-2.45,0.75) 5(-2.45,0.25) 6(-2.45,-0.25) 7(-2.45,-0.75) 8(-2.45,-1.25) 9(-2.45,-1.75) 10(-2.45,-2.25) 19(2.45,-2.25) 20(2.45,-1.75) 21(2.45,-1.25) 22(2.45,-0.75) 23(2.45,-0.25) 24(2.45,0.25) 25(2.45,0.75) 26(2.45,1.25) 27(2.45,1.75) 28(2.45,2.25)
  rrect25% 0.25x0.85 smd: 11(-1.75,-2.95) 12(-1.25,-2.95) 13(-0.75,-2.95) 14(-0.25,-2.95) 15(0.25,-2.95) 16(0.75,-2.95) 17(1.25,-2.95) 18(1.75,-2.95) 29(1.75,2.95) 30(1.25,2.95) 31(0.75,2.95) 32(0.25,2.95) 33(-0.25,2.95) 34(-0.75,2.95) 35(-1.25,2.95) 36(-1.75,2.95)
  rect 3.6x4.1 smd: 37(0,0)
  rrect25% 0.97x1.1 on Top Paste: Un1(-1.2,1.37) Un2(-1.2,0) Un3(-1.2,-1.37) Un4(0,1.37) Un5(0,0) Un6(0,-1.37) Un7(1.2,1.37) Un8(1.2,0) Un9(1.2,-1.37)
F.SilkS:
  region: -2.61,3.11 -2.85,3.44 -2.37,3.44
  lines w0.254: -2.61,-2.635 -2.61,-3.11 -2.135,-3.11 ; -2.61,2.635 -2.61,2.87 ; -2.31,3.11 -2.135,3.11 ; 2.135,-3.11 2.61,-3.11 2.61,-2.635 ; 2.135,3.11 2.61,3.11 2.61,2.635
Top Component Center:
  lines w0.127: -0.127,0 0.127,0 -0.127,0 ; 0,-0.127 0,0.127 0,-0.127
Top Assembly:
  region: 2.5,-3 -2.5,-3 -2.5,2 -1.5,3 2.5,3
Top Courtyard:
  lines w0.254: -3.13,-2.63 -3.13,2.63 -2.75,2.63 -2.75,3.25 -2.13,3.25 -2.13,3.63 2.13,3.63 2.13,3.25 2.75,3.25 2.75,2.63 3.13,2.63 3.13,-2.63 2.75,-2.63 2.75,-3.25 2.13,-3.25 2.13,-3.63 -2.13,-3.63 -2.13,-3.25 -2.75,-3.25 -2.75,-2.63 -3.13,-2.63
Top Designator:
  text ".Designator" at -3.43,-0.344 h1.52

## QFN-36-1EP_5x6mm_P0.5mm_EP3.6x4.1mm_ThermalVias [mm] "QFN-36-1EP_5x6mm_P0.5mm_EP3.6x4.1mm_ThermalVias"
pads (59):
  rrect25% 0.85x0.25 smd: 1(-2.45,2.25) 2(-2.45,1.75) 3(-2.45,1.25) 4(-2.45,0.75) 5(-2.45,0.25) 6(-2.45,-0.25) 7(-2.45,-0.75) 8(-2.45,-1.25) 9(-2.45,-1.75) 10(-2.45,-2.25) 19(2.45,-2.25) 20(2.45,-1.75) 21(2.45,-1.25) 22(2.45,-0.75) 23(2.45,-0.25) 24(2.45,0.25) 25(2.45,0.75) 26(2.45,1.25) 27(2.45,1.75) 28(2.45,2.25)
  rrect25% 0.25x0.85 smd: 11(-1.75,-2.95) 12(-1.25,-2.95) 13(-0.75,-2.95) 14(-0.25,-2.95) 15(0.25,-2.95) 16(0.75,-2.95) 17(1.25,-2.95) 18(1.75,-2.95) 29(1.75,2.95) 30(1.25,2.95) 31(0.75,2.95) 32(0.25,2.95) 33(-0.25,2.95) 34(-0.75,2.95) 35(-1.25,2.95) 36(-1.75,2.95)
  round 0.5 hole 0.2: 37(-1.55,-1.8) 37(-1.55,-0.6) 37(-1.55,0.6) 37(-1.55,1.8) 37(0,-1.8) 37(0,-0.6) 37(0,0.6) 37(0,1.8) 37(1.55,-1.8) 37(1.55,-0.6) 37(1.55,0.6) 37(1.55,1.8)
  rect 3.6x4.1 smd: 37(0,0)
  rect 3.6x4.1 smd far side: 37(0,0)
  rrect25% 0.93x1.06 on Top Paste: Un1(-1.2,1.37) Un2(-1.2,0) Un3(-1.2,-1.37) Un4(0,1.37) Un5(0,0) Un6(0,-1.37) Un7(1.2,1.37) Un8(1.2,0) Un9(1.2,-1.37)
F.SilkS:
  region: -2.61,3.11 -2.85,3.44 -2.37,3.44
  lines w0.254: -2.61,-2.635 -2.61,-3.11 -2.135,-3.11 ; -2.61,2.635 -2.61,2.87 ; -2.31,3.11 -2.135,3.11 ; 2.135,-3.11 2.61,-3.11 2.61,-2.635 ; 2.135,3.11 2.61,3.11 2.61,2.635
Top Component Center:
  lines w0.127: -0.127,0 0.127,0 -0.127,0 ; 0,-0.127 0,0.127 0,-0.127
Top Assembly:
  region: 2.5,-3 -2.5,-3 -2.5,2 -1.5,3 2.5,3
Top Courtyard:
  lines w0.254: -3.13,-2.63 -3.13,2.63 -2.75,2.63 -2.75,3.25 -2.13,3.25 -2.13,3.63 2.13,3.63 2.13,3.25 2.75,3.25 2.75,2.63 3.13,2.63 3.13,-2.63 2.75,-2.63 2.75,-3.25 2.13,-3.25 2.13,-3.63 -2.13,-3.63 -2.13,-3.25 -2.75,-3.25 -2.75,-2.63 -3.13,-2.63
Top Designator:
  text ".Designator" at -3.43,-0.344 h1.52
3D body "QFN-36-1EP_5x6mm_P0.5mm_EP3.6x4.6mm.step": height 0.77, standoff 0, extent -2.5,-3 2.5,3

## QFN-36-1EP_5x6mm_P0.5mm_EP3.6x4.6mm [mm] "QFN-36-1EP_5x6mm_P0.5mm_EP3.6x4.6mm"
pads (49):
  rrect25% 0.875x0.25 smd: 1(-2.438,2.25) 2(-2.438,1.75) 3(-2.438,1.25) 4(-2.438,0.75) 5(-2.438,0.25) 6(-2.438,-0.25) 7(-2.438,-0.75) 8(-2.438,-1.25) 9(-2.438,-1.75) 10(-2.438,-2.25) 19(2.438,-2.25) 20(2.438,-1.75) 21(2.438,-1.25) 22(2.438,-0.75) 23(2.438,-0.25) 24(2.438,0.25) 25(2.438,0.75) 26(2.438,1.25) 27(2.438,1.75) 28(2.438,2.25)
  rrect25% 0.25x0.875 smd: 11(-1.75,-2.937) 12(-1.25,-2.937) 13(-0.75,-2.937) 14(-0.25,-2.937) 15(0.25,-2.937) 16(0.75,-2.937) 17(1.25,-2.937) 18(1.75,-2.937) 29(1.75,2.937) 30(1.25,2.937) 31(0.75,2.937) 32(0.25,2.937) 33(-0.25,2.937) 34(-0.75,2.937) 35(-1.25,2.937) 36(-1.75,2.937)
  rect 3.6x4.6 smd: 37(0,0)
  rrect25% 0.97x0.93 on Top Paste: Un1(-1.2,1.725) Un2(-1.2,0.575) Un3(-1.2,-0.575) Un4(-1.2,-1.725) Un5(0,1.725) Un6(0,0.575) Un7(0,-0.575) Un8(0,-1.725) Un9(1.2,1.725) Un10(1.2,0.575) Un11(1.2,-0.575) Un12(1.2,-1.725)
F.SilkS:
  region: -2.61,3.11 -2.85,3.44 -2.37,3.44
  lines w0.254: -2.61,-2.635 -2.61,-3.11 -2.135,-3.11 ; -2.61,2.635 -2.61,2.87 ; -2.31,3.11 -2.135,3.11 ; 2.135,-3.11 2.61,-3.11 2.61,-2.635 ; 2.135,3.11 2.61,3.11 2.61,2.635
Top Component Center:
  lines w0.127: -0.127,0 0.127,0 -0.127,0 ; 0,-0.127 0,0.127 0,-0.127
Top Assembly:
  region: 2.5,-3 -2.5,-3 -2.5,2 -1.5,3 2.5,3
Top Courtyard:
  lines w0.254: -3.13,-2.63 -3.13,2.63 -2.75,2.63 -2.75,3.25 -2.13,3.25 -2.13,3.63 2.13,3.63 2.13,3.25 2.75,3.25 2.75,2.63 3.13,2.63 3.13,-2.63 2.75,-2.63 2.75,-3.25 2.13,-3.25 2.13,-3.63 -2.13,-3.63 -2.13,-3.25 -2.75,-3.25 -2.75,-2.63 -3.13,-2.63
Top Designator:
  text ".Designator" at -3.43,-0.344 h1.52
3D body "QFN-36-1EP_5x6mm_P0.5mm_EP3.6x4.6mm.step": height 0.77, standoff 0, extent -2.5,-3 2.5,3